# Altium schematic symbol library QuarterBridge_RevK.SchLib: 4 symbols
Pins are listed as number, name and electrical type; pins without a type are passive.

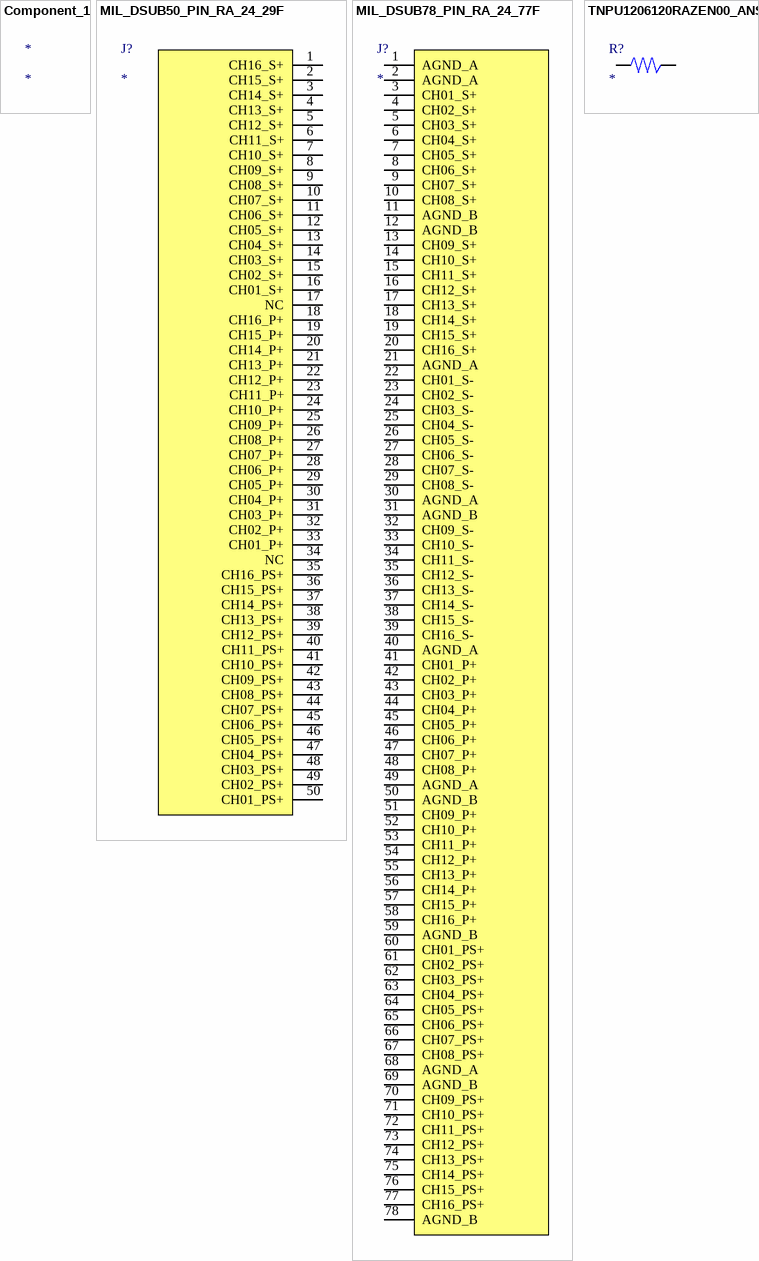
[diagram p0: symbols Component_1 to TNPU1206120RAZEN00_ANSI]

## Component_1
designator *

## MIL_DSUB50_PIN_RA_24_29F
designator J?
MIL-DTL-24308 right angle male; provisional spatial pinout, physical footprint not yet assigned
footprint QB_ITT_M24308_24_29F_RA_R1
pins: 1 CH16_S+, 2 CH15_S+, 3 CH14_S+, 4 CH13_S+, 5 CH12_S+, 6 CH11_S+, 7 CH10_S+, 8 CH09_S+, 9 CH08_S+, 10 CH07_S+, 11 CH06_S+, 12 CH05_S+, 13 CH04_S+, 14 CH03_S+, 15 CH02_S+, 16 CH01_S+, 17 NC, 18 CH16_P+, 19 CH15_P+, 20 CH14_P+, 21 CH13_P+, 22 CH12_P+, 23 CH11_P+, 24 CH10_P+, 25 CH09_P+, 26 CH08_P+, 27 CH07_P+, 28 CH06_P+, 29 CH05_P+, 30 CH04_P+, 31 CH03_P+, 32 CH02_P+, 33 CH01_P+, 34 NC, 35 CH16_PS+, 36 CH15_PS+, 37 CH14_PS+, 38 CH13_PS+, 39 CH12_PS+, 40 CH11_PS+, 41 CH10_PS+, 42 CH09_PS+, 43 CH08_PS+, 44 CH07_PS+, 45 CH06_PS+, 46 CH05_PS+, 47 CH04_PS+, 48 CH03_PS+, 49 CH02_PS+, 50 CH01_PS+

## MIL_DSUB78_PIN_RA_24_77F
designator J?
MIL-DTL-24308 right angle male; provisional spatial pinout, physical footprint not yet assigned
footprint QB_POS_M24308_24_77F_RA_R1
pins: 1 AGND_A, 2 AGND_A, 3 CH01_S+, 4 CH02_S+, 5 CH03_S+, 6 CH04_S+, 7 CH05_S+, 8 CH06_S+, 9 CH07_S+, 10 CH08_S+, 11 AGND_B, 12 AGND_B, 13 CH09_S+, 14 CH10_S+, 15 CH11_S+, 16 CH12_S+, 17 CH13_S+, 18 CH14_S+, 19 CH15_S+, 20 CH16_S+, 21 AGND_A, 22 CH01_S-, 23 CH02_S-, 24 CH03_S-, 25 CH04_S-, 26 CH05_S-, 27 CH06_S-, 28 CH07_S-, 29 CH08_S-, 30 AGND_A, 31 AGND_B, 32 CH09_S-, 33 CH10_S-, 34 CH11_S-, 35 CH12_S-, 36 CH13_S-, 37 CH14_S-, 38 CH15_S-, 39 CH16_S-, 40 AGND_A, 41 CH01_P+, 42 CH02_P+, 43 CH03_P+, 44 CH04_P+, 45 CH05_P+, 46 CH06_P+, 47 CH07_P+, 48 CH08_P+, 49 AGND_A, 50 AGND_B, 51 CH09_P+, 52 CH10_P+, 53 CH11_P+, 54 CH12_P+, 55 CH13_P+, 56 CH14_P+, 57 CH15_P+, 58 CH16_P+, 59 AGND_B, 60 CH01_PS+, 61 CH02_PS+, 62 CH03_PS+, 63 CH04_PS+, 64 CH05_PS+, 65 CH06_PS+, 66 CH07_PS+, 67 CH08_PS+, 68 AGND_A, 69 AGND_B, 70 CH09_PS+, 71 CH10_PS+, 72 CH11_PS+, 73 CH12_PS+, 74 CH13_PS+, 75 CH14_PS+, 76 CH15_PS+, 77 CH16_PS+, 78 AGND_B

## TNPU1206120RAZEN00_ANSI
designator R?
120 ohm 0.05% 5ppm/K 1206; ANSI zigzag
footprint QB_TNPU1206_IPC_R1
pins: 1, 2